# Altium schematic symbol library 2019-09-19_14-13-56.SchLib: 2 symbols
Pins are listed as number, name and electrical type; pins without a type are passive.

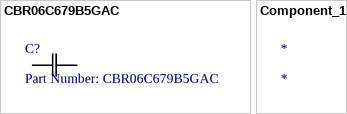
[diagram p0: symbols CBR06C679B5GAC to Component_1]

## CBR06C679B5GAC
designator C?, comment Part Number: CBR06C679B5GAC
No Description Available; Vendor: KEMET; Built_By: EMA_UL_Team; Type: DEV; Manufacturer_Part_Number: CBR06C679B5GAC; Copyright: Copyright (C) 2018 Accelerated Designs. All rights reserved; RefDes: RefDes; Value: Value
footprint CAP_CBR_0603
pins: 1, 2

## Component_1
designator *